# Altium schematic symbol library QPL9504TR7.SchLib: 1 symbol
Pins are listed as number, name and electrical type; pins without a type are passive.

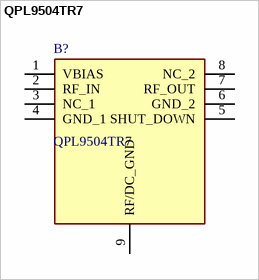
[diagram p0: symbol QPL9504TR7]

## QPL9504TR7
designator B?
Ultra Low Noise, Flat Gain LNA; Manufacturer_Name: Qorvo; Geometry.Height: 0.9mm; Manufacturer_Part_Number: QPL9504TR7; Mouser Part Number: 772-QPL9504TR7; Mouser Price/Stock: https://www.mouser.co.uk/ProductDetail/Qorvo/QPL9504TR7?qs=iLbezkQI%252BsiSWi8SJWi3jA%3D%3D; Arrow Part Number: *; Arrow Price/Stock: *; Datasheet Link: https://www.qorvo.com/products/d/da007934
footprint SON50P200X200X90-9N-D
pins: 1 VBIAS, 2 RF_IN, 3 NC_1, 4 GND_1, 5 SHUT_DOWN, 6 GND_2, 7 RF_OUT, 8 NC_2, 9 RF/DC_GND